# Altium schematic symbol library SW6106.SchLib: 1 symbol
Pins are listed as number, name and electrical type; pins without a type are passive.

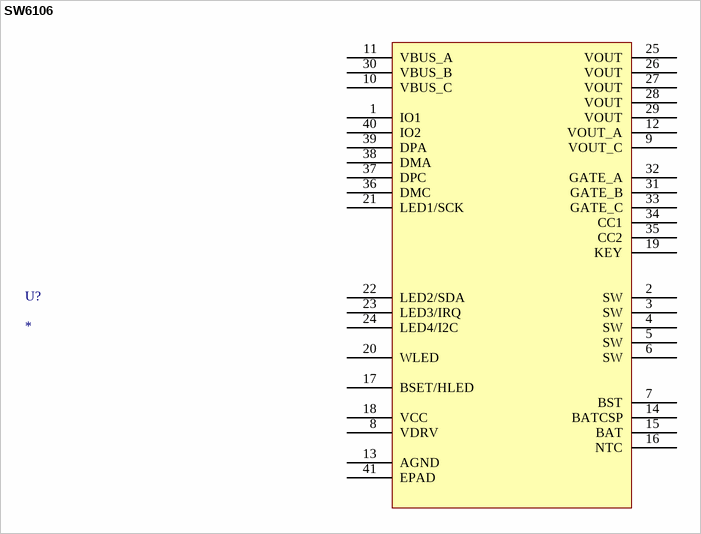
[diagram p0: symbol SW6106]

## SW6106
designator U?
SW6106 – Bidirectional Fast Charging Power Bank Management IC, 5V Output, QFN-40, 6×6mm.
footprint QFN50P600X600X80-41N (QFN, 40-Leads, Body 6.00x6.00mm, Pitch 0.50mm, Thermal Pad 4.20x4.20mm, IPC Medium Density)
pins: 1 IO1, 2 SW, 3 SW, 4 SW, 5 SW, 6 SW, 7 BST, 8 VDRV, 9 VOUT_C, 10 VBUS_C, 11 VBUS_A, 12 VOUT_A, 13 AGND, 14 BATCSP, 15 BAT, 16 NTC, 17 BSET/HLED, 18 VCC, 19 KEY, 20 WLED, 21 LED1/SCK, 22 LED2/SDA, 23 LED3/IRQ, 24 LED4/I2C, 25 VOUT, 26 VOUT, 27 VOUT, 28 VOUT, 29 VOUT, 30 VBUS_B, 31 GATE_B, 32 GATE_A, 33 GATE_C, 34 CC1, 35 CC2, 36 DMC, 37 DPC, 38 DMA, 39 DPA, 40 IO2, 41 EPAD